# EAGLE library part BQ24074RGTR (library astra)
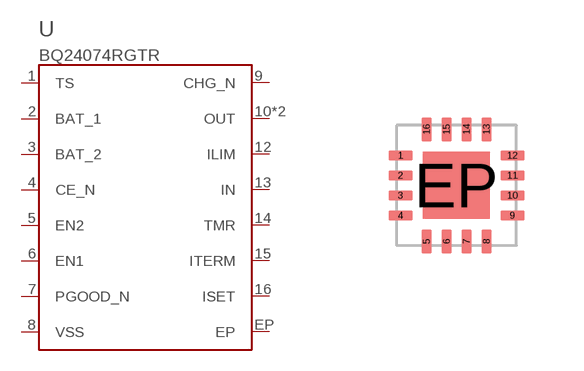
[diagram p2: symbol with the pads of TI_RGT16_BQ74; footprint TI_RGT16_BQ74]

Designator prefix U

## BQ24074RGTR  [TI_RGT16_BQ74]
1  TS  in
2  BAT_1
3  BAT_2
4  CE_N  in
5  EN2  in
6  EN1  in
7  PGOOD_N  oc
8  VSS  pwr
9  CHG_N  oc
10  OUT  out
11  OUT  out
12  ILIM  in
13  IN  pwr
14  TMR  in
15  ITERM  in
16  ISET
EP  EP  pwr

## Footprint TI_RGT16_BQ74 (pad centres in mm)
TI BQ24074, RGT0016C current package supplement, 4222419E p53 (July 2025). 0.25 wide pads (nominal 0.24), 1.68 exposed land. https://www.ti.com/lit/ds/symlink/bq24074.pdf
smd 0.6 x 0.25: 1 -1.4,0.75; 2 -1.4,0.25; 3 -1.4,-0.25; 4 -1.4,-0.75; 9 1.4,-0.75; 10 1.4,-0.25; 11 1.4,0.25; 12 1.4,0.75
smd 0.25 x 0.6: 5 -0.75,-1.4; 6 -0.25,-1.4; 7 0.25,-1.4; 8 0.75,-1.4; 13 0.75,1.4; 14 0.25,1.4; 15 -0.25,1.4; 16 -0.75,1.4
smd 1.68 x 1.68: EP 0,0